# EAGLE library part MODULE-ESP32-TYPE (library modules)
Module of the ESP32 type (indicative)
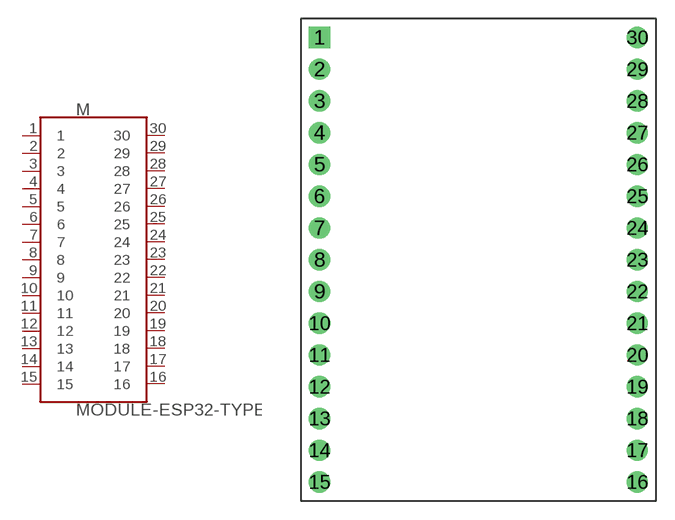
[diagram p0: symbol with the pads of MODULE-ESP32-TYPE; footprint MODULE-ESP32-TYPE]

Designator prefix M

## MODULE-ESP32-TYPE  [MODULE-ESP32-TYPE]
1  1  pas
2  2  pas
3  3  pas
4  4  pas
5  5  pas
6  6  pas
7  7  pas
8  8  pas
9  9  pas
10  10  pas
11  11  pas
12  12  pas
13  13  pas
14  14  pas
15  15  pas
16  16  pas
17  17  pas
18  18  pas
19  19  pas
20  20  pas
21  21  pas
22  22  pas
23  23  pas
24  24  pas
25  25  pas
26  26  pas
27  27  pas
28  28  pas
29  29  pas
30  30  pas

## Footprint MODULE-ESP32-TYPE (pad centres in mm)
Module of the ESP32 type, 2 x 15 pins, rows 25.4 mm apart (indicative sizes: measure yours). Sizes: indicative only: a generic module on 2.54 mm pin strips, not the drawing of any product. Not verified against a datasheet.
drill 1 pad 1.7 square: 1 -12.7,17.78
drill 1 pad 1.7: 2 -12.7,15.24; 3 -12.7,12.7; 4 -12.7,10.16; 5 -12.7,7.62; 6 -12.7,5.08; 7 -12.7,2.54; 8 -12.7,0; 9 -12.7,-2.54; 10 -12.7,-5.08; 11 -12.7,-7.62; 12 -12.7,-10.16; 13 -12.7,-12.7; 14 -12.7,-15.24; 15 -12.7,-17.78; 16 12.7,-17.78; 17 12.7,-15.24; 18 12.7,-12.7; 19 12.7,-10.16; 20 12.7,-7.62; 21 12.7,-5.08; 22 12.7,-2.54; 23 12.7,0; 24 12.7,2.54; 25 12.7,5.08; 26 12.7,7.62; 27 12.7,10.16; 28 12.7,12.7; 29 12.7,15.24; 30 12.7,17.78